# Altium footprint library ISO485_Parts.PcbLib: 9 footprints
Each footprint in its own frame and in the unit in brackets; x right, y up, seen from the top. Pads: shape width x height; smd on the part's side, far side on the other; paste and mask are expansions set on the pad; w line width, h text height; cw(c..) or ccw(c..) is an arc to the next point about the centre after c.
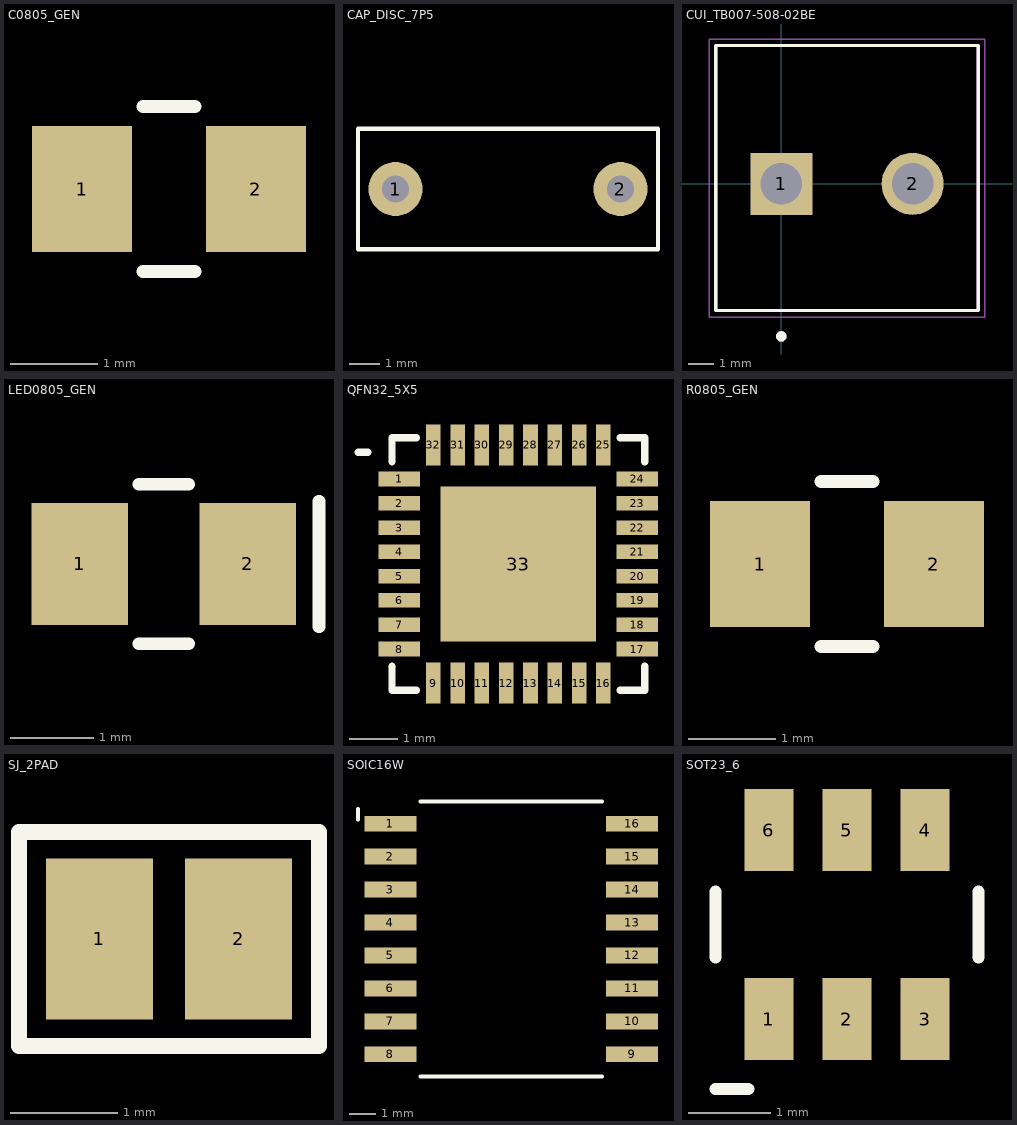
[diagram p0: the footprints below, top view; thin cyan lines are the x and y axes]

## C0805_GEN [mm] "Chip capacitor 0805"
height 0.9
pads (2):
  rect 1.15x1.45 smd: 1(1269,1270) 2(1271,1270)
Top Overlay:
  lines w0.15: 1269.7,1269.05 1270.3,1269.05 ; 1269.7,1270.95 1270.3,1270.95

## CAP_DISC_7P5 [mm] "Ceramic disc / Y-cap, 7.5mm lead pitch"
height 12
pads (2):
  round 1.8 hole 0.9: 1(1266.25,1270) 2(1273.75,1270)
Top Overlay:
  lines w0.15: 1265,1268 1275,1268 1275,1272 1265,1272 1265,1268

## CUI_TB007-508-02BE [mm]
pads (2):
  rect 2.4x2.4 / inner round 2.4 / far side rect 2.4x2.4 hole 1.6: 1(0,0)
  round 2.4 hole 1.6: 2(5.08,0)
Top Overlay:
  circle w0.2: c0,-5.9 r0.1
  lines w0.127: -2.54,-4.9 7.62,-4.9 7.62,5.35 -2.54,5.35 -2.54,-4.9
Assembly Top:
  circle w0.2: c0,-5.9 r0.1
  lines w0.127: -2.54,-4.9 7.62,-4.9 7.62,5.35 -2.54,5.35 -2.54,-4.9
Courtyard Top:
  lines w0.05: -2.79,-5.15 -2.79,5.6 7.87,5.6 7.87,-5.15 -2.79,-5.15
3D body "step_temp.STEP": height 14, standoff -3.7, extent -3.14,-4.9 7.62,5.35

## LED0805_GEN [mm] "LED 0805, pad1 = A, pad2 = K"
height 0.9
pads (2):
  rect 1.15x1.45 smd: 1(1269,1270) 2(1271,1270)
Top Overlay:
  lines w0.15: 1269.7,1269.05 1270.3,1269.05 ; 1269.7,1270.95 1270.3,1270.95 ; 1271.85,1269.25 1271.85,1270.75

## QFN32_5X5 [mm] "QFN-32 5x5mm 0.5mm pitch, EP 3.2mm (FT232RQ)"
height 1
pads (33):
  rect 0.85x0.3 smd: 1(1267.55,1271.75) 2(1267.55,1271.25) 3(1267.55,1270.75) 4(1267.55,1270.25) 5(1267.55,1269.75) 6(1267.55,1269.25) 7(1267.55,1268.75) 8(1267.55,1268.25) 17(1272.45,1268.25) 18(1272.45,1268.75) 19(1272.45,1269.25) 20(1272.45,1269.75) 21(1272.45,1270.25) 22(1272.45,1270.75) 23(1272.45,1271.25) 24(1272.45,1271.75)
  rect 0.3x0.85 smd: 9(1268.25,1267.55) 10(1268.75,1267.55) 11(1269.25,1267.55) 12(1269.75,1267.55) 13(1270.25,1267.55) 14(1270.75,1267.55) 15(1271.25,1267.55) 16(1271.75,1267.55) 25(1271.75,1272.45) 26(1271.25,1272.45) 27(1270.75,1272.45) 28(1270.25,1272.45) 29(1269.75,1272.45) 30(1269.25,1272.45) 31(1268.75,1272.45) 32(1268.25,1272.45)
  rect 3.2x3.2 smd: 33(1270,1270)
Top Overlay:
  lines w0.15: 1266.7,1272.3 1266.9,1272.3 ; 1267.4,1267.9 1267.4,1267.4 1267.9,1267.4 ; 1267.4,1272.1 1267.4,1272.6 1267.9,1272.6 ; 1272.1,1267.4 1272.6,1267.4 1272.6,1267.9 ; 1272.1,1272.6 1272.6,1272.6 1272.6,1272.1

## R0805_GEN [mm] "Chip resistor 0805"
height 0.9
pads (2):
  rect 1.15x1.45 smd: 1(1269,1270) 2(1271,1270)
Top Overlay:
  lines w0.15: 1269.7,1269.05 1270.3,1269.05 ; 1269.7,1270.95 1270.3,1270.95

## SJ_2PAD [mm] "Solder jumper 2-pad, normally open"
pads (2):
  rect 1x1.5 smd: 1(1269.35,1270) 2(1270.65,1270)
Top Overlay:
  lines w0.15: 1268.6,1269 1271.4,1269 1271.4,1271 1268.6,1271 1268.6,1269

## SOIC16W [mm] "SOIC-16 Wide 7.5mm body, 1.27mm pitch (ISO3082DW)"
height 2.65
pads (16):
  rect 2x0.6 smd: 1(1265.35,1274.445) 2(1265.35,1273.175) 3(1265.35,1271.905) 4(1265.35,1270.635) 5(1265.35,1269.365) 6(1265.35,1268.095) 7(1265.35,1266.825) 8(1265.35,1265.555) 9(1274.65,1265.555) 10(1274.65,1266.825) 11(1274.65,1268.095) 12(1274.65,1269.365) 13(1274.65,1270.635) 14(1274.65,1271.905) 15(1274.65,1273.175) 16(1274.65,1274.445)
Top Overlay:
  lines w0.15: 1264.1,1274.6 1264.1,1275 ; 1266.5,1264.7 1273.5,1264.7 ; 1266.5,1275.3 1273.5,1275.3

## SOT23_6 [mm] "SOT-23-6 (USBLC6-2SC6)"
height 1.45
pads (6):
  rect 0.6x1 smd: 1(1269.05,1268.85) 2(1270,1268.85) 3(1270.95,1268.85) 4(1270.95,1271.15) 5(1270,1271.15) 6(1269.05,1271.15)
Top Overlay:
  lines w0.15: 1268.4,1268 1268.8,1268 ; 1268.4,1269.6 1268.4,1270.4 ; 1271.6,1269.6 1271.6,1270.4